# Altium footprint library MCRJ332768F1220HOW.PcbLib: 1 footprints
Each footprint in its own frame and in the unit in brackets; x right, y up, seen from the top. Pads: shape width x height; smd on the part's side, far side on the other; paste and mask are expansions set on the pad; w line width, h text height; cw(c..) or ccw(c..) is an arc to the next point about the centre after c.
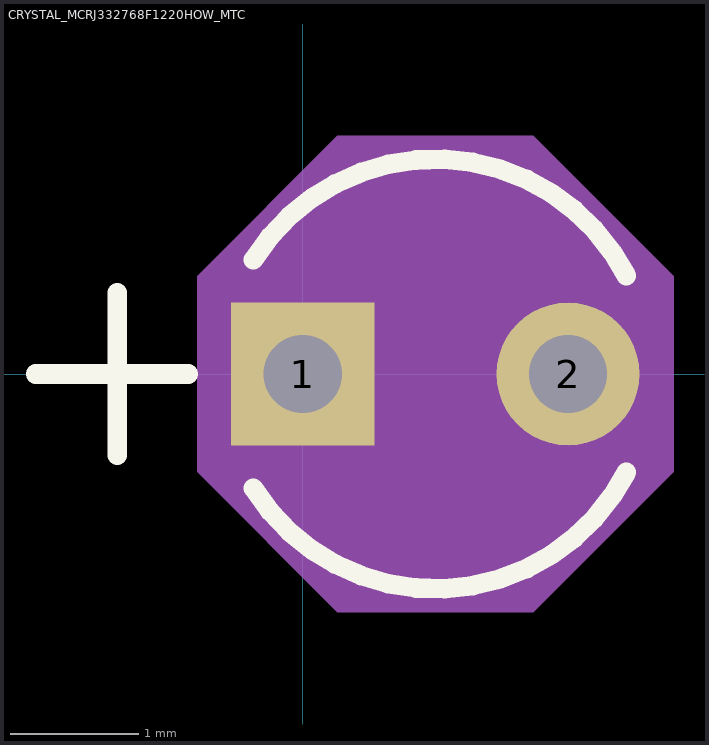
[diagram p0: the footprint, top view; thin cyan lines are the x and y axes]

## CRYSTAL_MCRJ332768F1220HOW_MTC [mil]
pads (2):
  rect 44x44 hole 24 paste-22 mask+0: 1(0,0)
  round 44 hole 24 paste-22 mask+0: 2(81.5,0)
Top Overlay:
  lines w6: -82,0 -35.1,0 ; -57,-25 -57,25 ; -15.14,-35.1 ccw(c40.75,0) 99.46,-30.16 ; -15.14,35.1 cw(c40.75,0) 99.46,30.16
  text ".Designator" at -96.75,-25 h50
Mechanical 13:
  circle w1: c40.75,0 r61
  lines w1: -82,0 -32,0 ; -57,-25 -57,25
  text ".Designator" at -96.75,-25 h50
Mechanical 15:
  region: -32,29.96 10.79,72.75 70.71,72.75 113.5,29.96 113.5,-29.96 70.71,-72.75 10.79,-72.75 -32,-29.96
  lines w1: -32,-29.96 10.79,-72.75 70.71,-72.75 113.5,-29.96 113.5,29.96 70.71,72.75 10.79,72.75 -32,29.96 -32,-29.96
3D body "CRYSTAL_MCRJ332768F1220HOW_MTC.step": height 327.6, standoff -142.01, extent -20.24,-60.56 103.01,60.56